# EAGLE library part USBLC6-2SC6 (library astra)
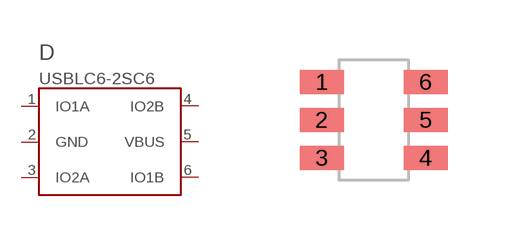
[diagram p6: symbol with the pads of ST_SOT23_6_ESD; footprint ST_SOT23_6_ESD]

Designator prefix D

## USBLC6-2SC6  [ST_SOT23_6_ESD]
1  IO1A  pas
2  GND  pwr
3  IO2A  pas
4  IO2B  pas
5  VBUS  pas
6  IO1B  pas

## Footprint ST_SOT23_6_ESD (pad centres in mm)
ST USBLC6-2SC6 SOT23-6L recommended footprint. Pins 1–3 descending left and 4–6 ascending right. https://www.st.com/resource/en/datasheet/usblc6-2.pdf
smd 1.1 x 0.6: 1 -1.3,0.95; 2 -1.3,0; 3 -1.3,-0.95; 4 1.3,-0.95; 5 1.3,0; 6 1.3,0.95